# Altium schematic symbol library AudioMoth 1.1.SCHLIB: 220 symbols (part 3 of 3)
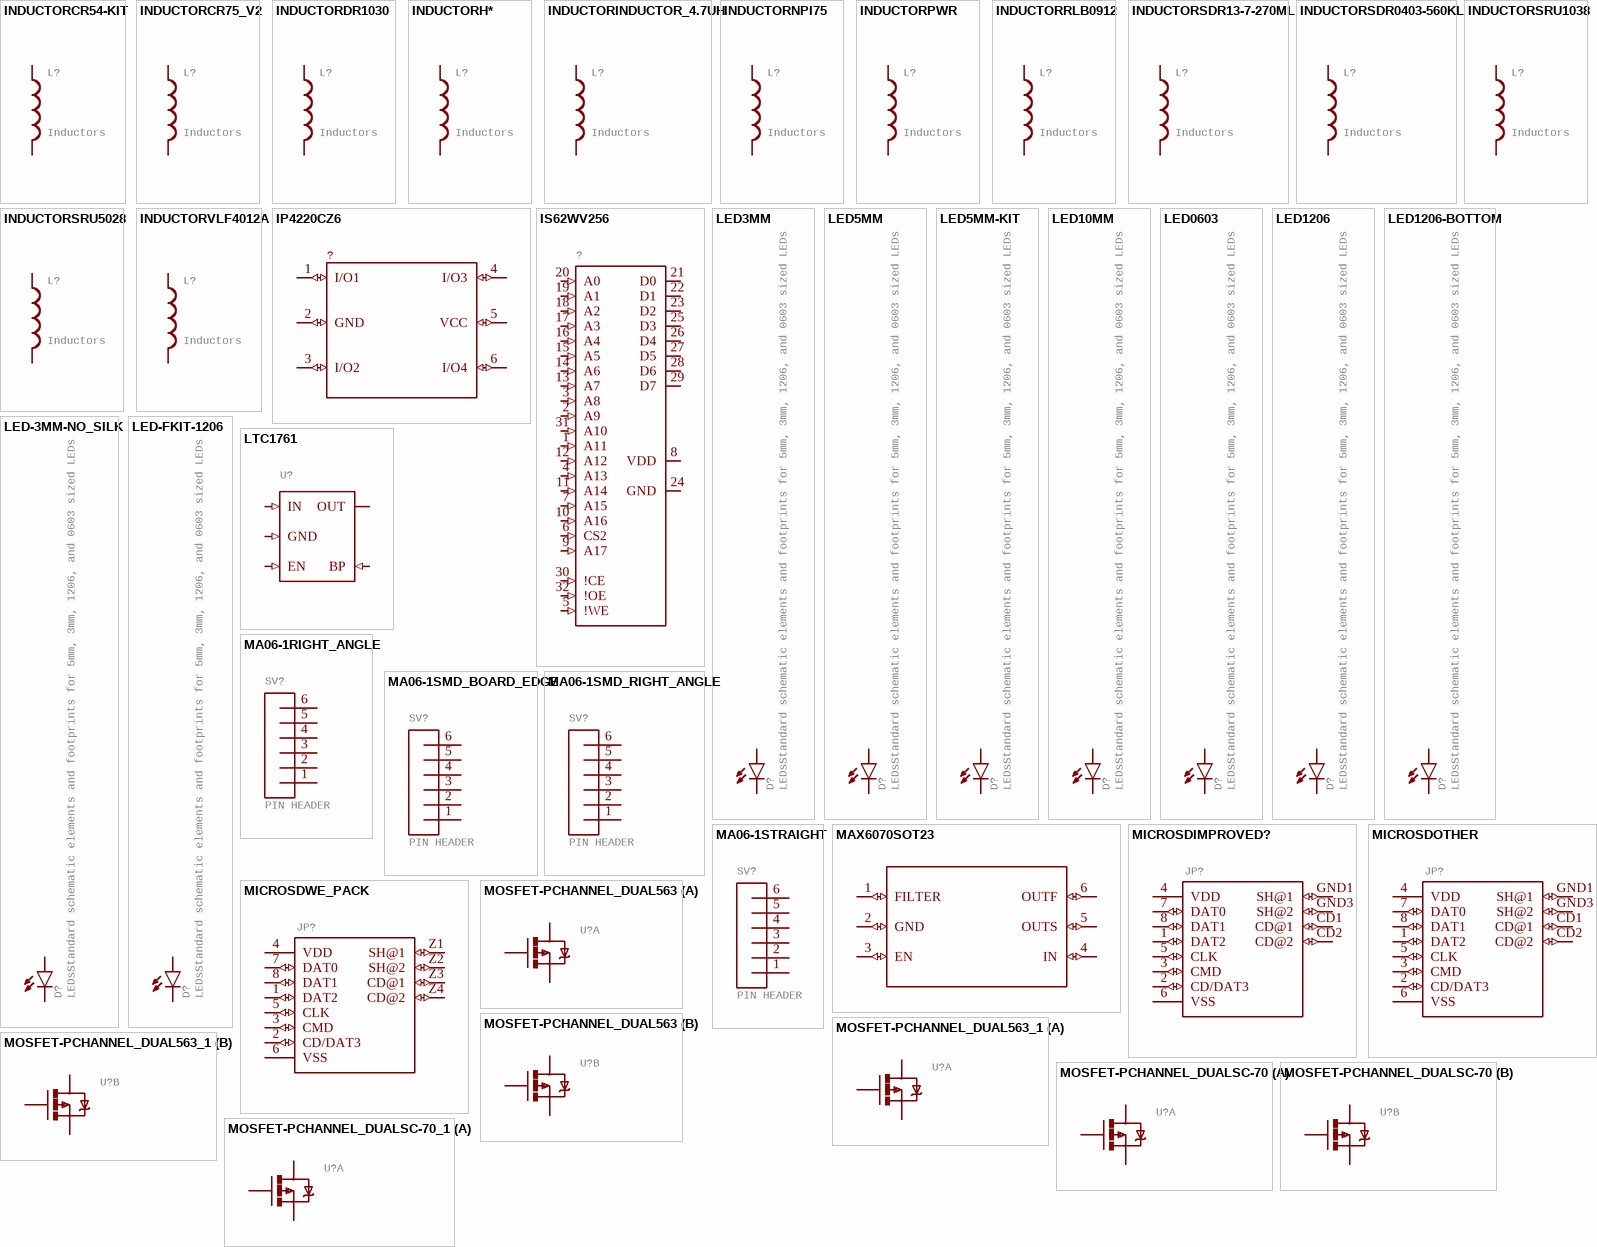
[diagram p16: symbols INDUCTORCR54-KIT to MOSFET-PCHANNEL_DUALSC-70_1]

## MOSFET-PCHANNEL_DUAL563
designator U?
GateName_1: G1; SymbolName_1: MOSFET-PCHANNEL; GateName_2: G2; DeviceName: 563; DeviceSetName: MOSFET-PCHANNEL_DUAL; SymbolName_2: MOSFET-PCHANNEL; LibraryName: AudioMoth 1.1.0; Package: SOT563
footprint SOT563
part A pins: D1 D, G1 G, S1 S
part B pins: D2 D, G2 G, S2 S

## MOSFET-PCHANNEL_DUAL563_1
designator U?
GateName_1: G1; SymbolName_1: MOSFET-PCHANNEL; GateName_2: G2; DeviceName: 563; DeviceSetName: MOSFET-PCHANNEL_DUAL; SymbolName_2: MOSFET-PCHANNEL; LibraryName: AudioMoth 1.1.0; Package: SOT563
footprint SOT563
part A pins: D1 D, G1 G, S1 S
part B pins: D2 D, G2 G, S2 S

## MOSFET-PCHANNEL_DUALSC-70
designator U?
GateName_1: G1; SymbolName_1: MOSFET-PCHANNEL; GateName_2: G2; DeviceName: SC-70; DeviceSetName: MOSFET-PCHANNEL_DUAL; SymbolName_2: MOSFET-PCHANNEL; LibraryName: AudioMoth 1.1.0; Package: SC-70
footprint SC-70
part A pins: 1 S, 2 G, 6 D
part B pins: 3 D, 4 S, 5 G

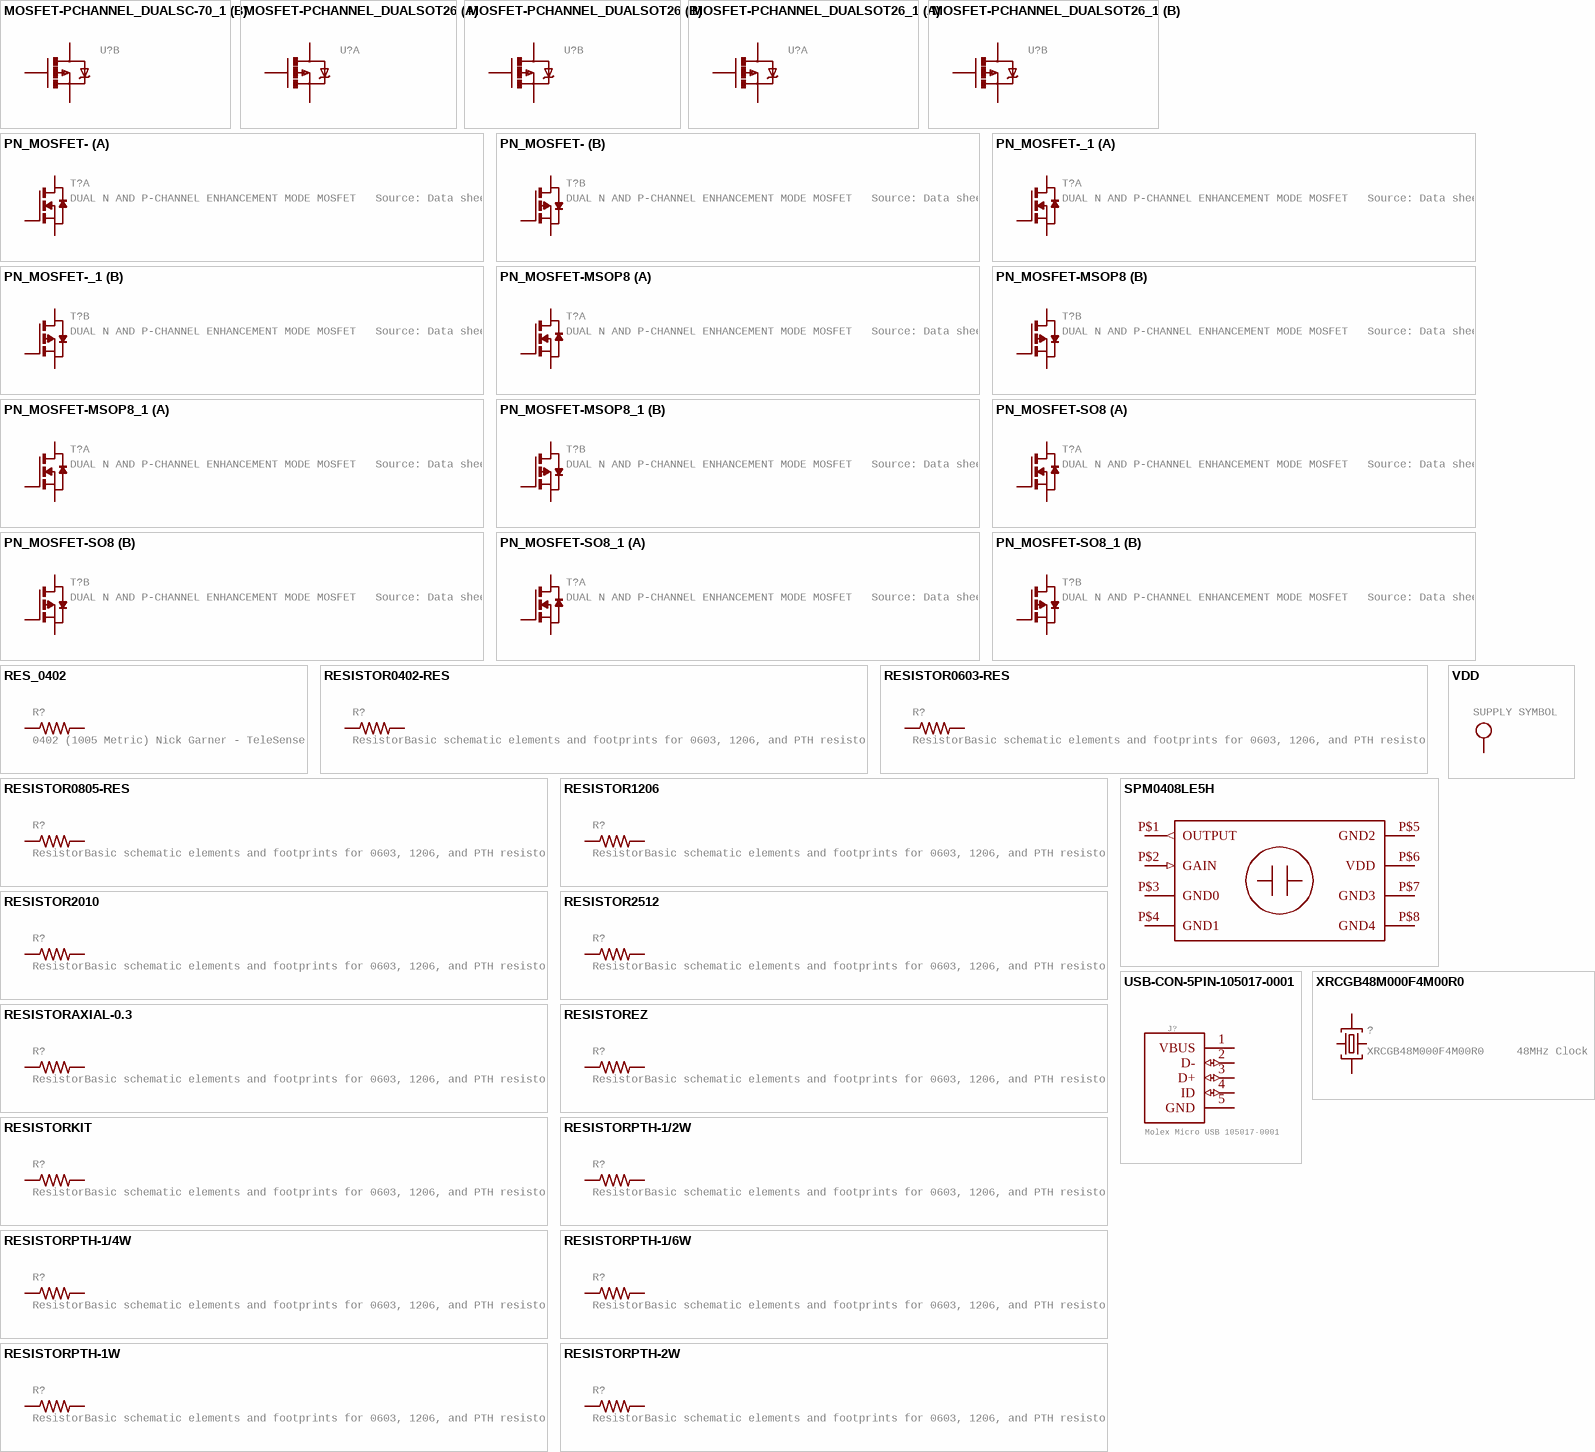
[diagram p14: symbols MOSFET-PCHANNEL_DUALSC-70_1 to XRCGB48M000F4M00R0]

## MOSFET-PCHANNEL_DUALSC-70_1
designator U?
GateName_1: G1; SymbolName_1: MOSFET-PCHANNEL; GateName_2: G2; DeviceName: SC-70; DeviceSetName: MOSFET-PCHANNEL_DUAL; SymbolName_2: MOSFET-PCHANNEL; LibraryName: AudioMoth 1.1.0; Package: SC-70
footprint SC-70
part A pins: 1 S, 2 G, 6 D
part B pins: 3 D, 4 S, 5 G

## MOSFET-PCHANNEL_DUALSOT26
designator U?
GateName_1: G1; SymbolName_1: MOSFET-PCHANNEL; GateName_2: G2; DeviceName: SOT26; DeviceSetName: MOSFET-PCHANNEL_DUAL; PROD_ID: TRAN-12444; SymbolName_2: MOSFET-PCHANNEL; LibraryName: AudioMoth 1.1.0; Package: SOT26
footprint SOT26
part A pins: D1 D, G1 G, S1 S
part B pins: D2 D, G2 G, S2 S

## MOSFET-PCHANNEL_DUALSOT26_1
designator U?
GateName_1: G1; SymbolName_1: MOSFET-PCHANNEL; GateName_2: G2; DeviceName: SOT26; DeviceSetName: MOSFET-PCHANNEL_DUAL; PROD_ID: TRAN-12444; SymbolName_2: MOSFET-PCHANNEL; LibraryName: AudioMoth 1.1.0; Package: SOT26
footprint SOT26
part A pins: D1 D, G1 G, S1 S
part B pins: D2 D, G2 G, S2 S

## PN_MOSFET-
designator T?, comment DUAL N AND P-CHANNEL ENHANCEMENT MODE MOSFET   Source: Data sheet
GateName_1: 1; SymbolName_1: N_MOSFET; GateName_2: 2; SymbolName_2: P_MOSFET; DeviceSetName: PN_MOSFET-; LibraryName: AudioMoth 1.1.0; Package: SOT23-6
footprint SOT23-6
part A pins: 1 G, 5 S, 6 D
part B pins: 2 S, 3 G, 4 D

## PN_MOSFET-_1
designator T?, comment DUAL N AND P-CHANNEL ENHANCEMENT MODE MOSFET   Source: Data sheet
GateName_1: 1; SymbolName_1: N_MOSFET; GateName_2: 2; SymbolName_2: P_MOSFET; DeviceSetName: PN_MOSFET-; LibraryName: AudioMoth 1.1.0; Package: SOT23-6
footprint SOT23-6
part A pins: 1 G, 5 S, 6 D
part B pins: 2 S, 3 G, 4 D

## PN_MOSFET-MSOP8
designator T?, comment DUAL N AND P-CHANNEL ENHANCEMENT MODE MOSFET   Source: Data sheet
GateName_1: 1; SymbolName_1: N_MOSFET; GateName_2: 2; SymbolName_2: P_MOSFET; DeviceName: MSOP8; DeviceSetName: PN_MOSFET-; LibraryName: AudioMoth 1.1.0; Package: MSOP8; OC_FARNELL: unknown; OC_NEWARK: unknown
footprint MSOP8
part A pins: 1 S, 2 G, 7,8 D
part B pins: 3 S, 4 G, 5,6 D

## PN_MOSFET-MSOP8_1
designator T?, comment DUAL N AND P-CHANNEL ENHANCEMENT MODE MOSFET   Source: Data sheet
GateName_1: 1; SymbolName_1: N_MOSFET; GateName_2: 2; SymbolName_2: P_MOSFET; DeviceName: MSOP8; DeviceSetName: PN_MOSFET-; LibraryName: AudioMoth 1.1.0; Package: MSOP8; OC_FARNELL: unknown; OC_NEWARK: unknown
footprint MSOP8
part A pins: 1 S, 2 G, 7,8 D
part B pins: 3 S, 4 G, 5,6 D

## PN_MOSFET-SO8
designator T?, comment DUAL N AND P-CHANNEL ENHANCEMENT MODE MOSFET   Source: Data sheet
GateName_1: 1; SymbolName_1: N_MOSFET; GateName_2: 2; SymbolName_2: P_MOSFET; DeviceName: SO8; DeviceSetName: PN_MOSFET-; LibraryName: AudioMoth 1.1.0; Package: SO8; OC_FARNELL: unknown; OC_NEWARK: unknown
footprint SO8
part A pins: 1 S, 2 G, 7,8 D
part B pins: 3 S, 4 G, 5,6 D

## PN_MOSFET-SO8_1
designator T?, comment DUAL N AND P-CHANNEL ENHANCEMENT MODE MOSFET   Source: Data sheet
GateName_1: 1; SymbolName_1: N_MOSFET; GateName_2: 2; SymbolName_2: P_MOSFET; DeviceName: SO8; DeviceSetName: PN_MOSFET-; LibraryName: AudioMoth 1.1.0; Package: SO8; OC_FARNELL: unknown; OC_NEWARK: unknown
footprint SO8
part A pins: 1 S, 2 G, 7,8 D
part B pins: 3 S, 4 G, 5,6 D

## RES_0402
designator R?, comment 0402 (1005 Metric) Nick Garner - TeleSense
GateName_1: G$1; SymbolName_1: RESISTOR; DeviceSetName: RES_0402; LibraryName: AudioMoth 1.1.0; Package: 0402
footprint 0402
pins: 1, 2

## RESISTOR0402-RES
designator R?, comment ResistorBasic schematic elements and footprints for 0603, 1206, and PTH resistors.
GateName_1: G$1; DeviceName: 0402-RES; SymbolName_1: RESISTOR; LibraryName: AudioMoth 1.1.0; DeviceSetName: RESISTOR; Package: 0402-RES
footprint 0402-RES
pins: 1, 2

## RESISTOR0603-RES
designator R?, comment ResistorBasic schematic elements and footprints for 0603, 1206, and PTH resistors.
GateName_1: G$1; DeviceName: 0603-RES; SymbolName_1: RESISTOR; LibraryName: AudioMoth 1.1.0; DeviceSetName: RESISTOR; Package: 0603-RES
footprint 0603-RES
pins: 1, 2

## RESISTOR0805-RES
designator R?, comment ResistorBasic schematic elements and footprints for 0603, 1206, and PTH resistors.
GateName_1: G$1; DeviceName: 0805-RES; SymbolName_1: RESISTOR; LibraryName: AudioMoth 1.1.0; DeviceSetName: RESISTOR; Package: 0805
footprint 0805
pins: 1, 2

## RESISTOR1206
designator R?, comment ResistorBasic schematic elements and footprints for 0603, 1206, and PTH resistors.
GateName_1: G$1; DeviceName: 1206; SymbolName_1: RESISTOR; LibraryName: AudioMoth 1.1.0; DeviceSetName: RESISTOR; Package: 1206
footprint 1206
pins: 1, 2

## RESISTOR2010
designator R?, comment ResistorBasic schematic elements and footprints for 0603, 1206, and PTH resistors.
GateName_1: G$1; DeviceName: 2010; SymbolName_1: RESISTOR; LibraryName: AudioMoth 1.1.0; DeviceSetName: RESISTOR; Package: R2010
footprint R2010
pins: 1, 2

## RESISTOR2512
designator R?, comment ResistorBasic schematic elements and footprints for 0603, 1206, and PTH resistors.
GateName_1: G$1; DeviceName: 2512; SymbolName_1: RESISTOR; LibraryName: AudioMoth 1.1.0; DeviceSetName: RESISTOR; Package: R2512
footprint R2512
pins: 1, 2

## RESISTORAXIAL-0.3
designator R?, comment ResistorBasic schematic elements and footprints for 0603, 1206, and PTH resistors.
GateName_1: G$1; DeviceName: AXIAL-0.3; SymbolName_1: RESISTOR; LibraryName: AudioMoth 1.1.0; DeviceSetName: RESISTOR; Package: AXIAL-0.3
footprint AXIAL-0.3
pins: P$1 1, P$2 2

## RESISTOREZ
designator R?, comment ResistorBasic schematic elements and footprints for 0603, 1206, and PTH resistors.
GateName_1: G$1; DeviceName: EZ; SymbolName_1: RESISTOR; LibraryName: AudioMoth 1.1.0; DeviceSetName: RESISTOR; Package: AXIAL-0.3EZ
footprint AXIAL-0.3EZ
pins: P$1 1, P$2 2

## RESISTORKIT
designator R?, comment ResistorBasic schematic elements and footprints for 0603, 1206, and PTH resistors.
GateName_1: G$1; DeviceName: KIT; SymbolName_1: RESISTOR; LibraryName: AudioMoth 1.1.0; DeviceSetName: RESISTOR; Package: AXIAL-0.3-KIT
footprint AXIAL-0.3-KIT
pins: P$1 1, P$2 2

## RESISTORPTH-1/2W
designator R?, comment ResistorBasic schematic elements and footprints for 0603, 1206, and PTH resistors.
GateName_1: G$1; DeviceName: PTH-1/2W; SymbolName_1: RESISTOR; LibraryName: AudioMoth 1.1.0; DeviceSetName: RESISTOR; Package: AXIAL-0.5
footprint AXIAL-0.5
pins: P$1 1, P$2 2

## RESISTORPTH-1/4W
designator R?, comment ResistorBasic schematic elements and footprints for 0603, 1206, and PTH resistors.
GateName_1: G$1; DeviceName: PTH-1/4W; SymbolName_1: RESISTOR; LibraryName: AudioMoth 1.1.0; DeviceSetName: RESISTOR; Package: AXIAL-0.4
footprint AXIAL-0.4
pins: P$1 1, P$2 2

## RESISTORPTH-1/6W
designator R?, comment ResistorBasic schematic elements and footprints for 0603, 1206, and PTH resistors.
GateName_1: G$1; DeviceName: PTH-1/6W; SymbolName_1: RESISTOR; LibraryName: AudioMoth 1.1.0; DeviceSetName: RESISTOR; Package: 1/6W-RES
footprint 1/6W-RES
pins: 1, 2

## RESISTORPTH-1W
designator R?, comment ResistorBasic schematic elements and footprints for 0603, 1206, and PTH resistors.
GateName_1: G$1; DeviceName: PTH-1W; SymbolName_1: RESISTOR; LibraryName: AudioMoth 1.1.0; DeviceSetName: RESISTOR; Package: AXIAL-0.6
footprint AXIAL-0.6
pins: P$1 1, P$2 2

## RESISTORPTH-2W
designator R?, comment ResistorBasic schematic elements and footprints for 0603, 1206, and PTH resistors.
GateName_1: G$1; DeviceName: PTH-2W; SymbolName_1: RESISTOR; LibraryName: AudioMoth 1.1.0; DeviceSetName: RESISTOR; Package: AXIAL-0.8
footprint AXIAL-0.8
pins: P$1 1, P$2 2

## SPM0408LE5H
designator U?
GateName_1: G$1; SymbolName_1: SPM0408LE5H; LibraryName: AudioMoth 1.1.0; DeviceSetName: SPM0408LE5H; Package: SPM0408LE5H-TB
footprint SPM0408LE5H-TB
pins: P$1 OUTPUT (out), P$2 GAIN (in), P$3 GND0 (power), P$4 GND1 (power), P$5 GND2 (power), P$6 VDD (power), P$7 GND3 (power), P$8 GND4 (power)

## USB-CON-5PIN-105017-0001
designator J?, comment Molex Micro USB 105017-0001
GateName_1: G$1; SymbolName_1: USB-5PIN; DeviceName: -105017-0001; DeviceSetName: USB-CON-5PIN; LibraryName: AudioMoth 1.1.0; Package: USB-MICRO-MOLEX-105017-0001
footprint USB-MICRO-MOLEX-105017-0001
pins: 1 VBUS (power), 2 D- (io), 3 D+ (io), 4 ID (io), 5 GND (power)

## VDD
designator SUPPLY?, comment SUPPLY SYMBOL
GateName_1: G$1; SymbolName_1: VDD; LibraryName: AudioMoth 1.1.0; DeviceSetName: VDD
pins: ?1 VDD (power)

## XRCGB48M000F4M00R0
designator ?, comment XRCGB48M000F4M00R0     48MHz Clock
GateName_1: G$1; SymbolName_1: CRYSTAL-FILTER-3-POL; LibraryName: AudioMoth 1.1.0; DeviceSetName: XRCGB48M000F4M00R0; Package: XRCGB48M000F4M00R0
footprint XRCGB48M000F4M00R0
pins: P$1 1, P$2 2, P$3 3, P$4 4